# Altium footprint library CHIP-Library.PcbLib: 345 footprints (part 3 of 22)
Each footprint in its own frame and in the unit in brackets; x right, y up, seen from the top. Pads: shape width x height; smd on the part's side, far side on the other; paste and mask are expansions set on the pad; w line width, h text height; cw(c..) or ccw(c..) is an arc to the next point about the centre after c.
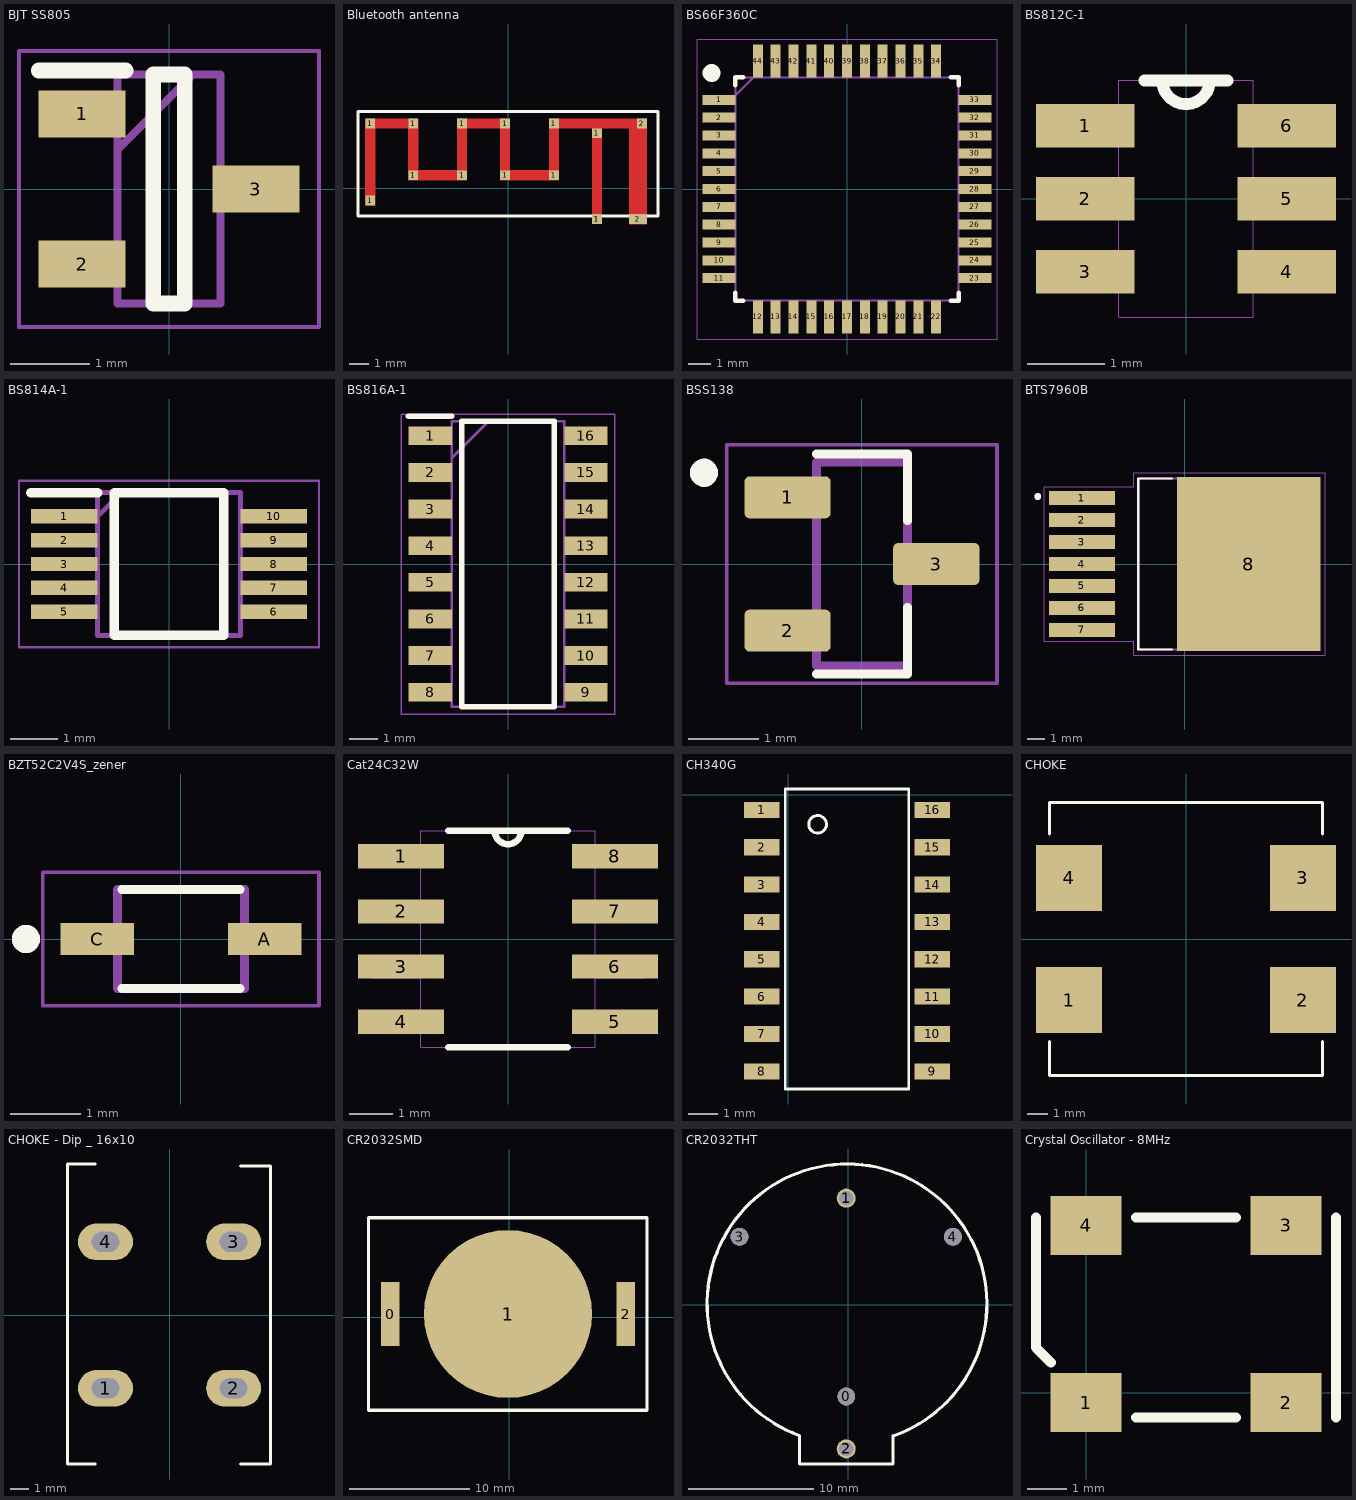
[diagram p2: the footprints below, top view; thin cyan lines are the x and y axes]

## BJT SS805 [mm]
pads (3):
  rect 1.1x0.6 smd: 1(-1.1,0.95) 2(-1.1,-0.95) 3(1.1,0)
Top Overlay:
  lines w0.2: -1.65,1.5 -0.55,1.5 ; -0.2,-1.45 -0.2,1.45 0.2,1.45 0.2,-1.45 -0.2,-1.45
Mechanical 4:
  lines w0.05: -1.9,-1.75 -1.9,1.75 ; -1.9,-1.75 1.9,-1.75 ; -1.9,-1.75 -1.9,1.75 ; -1.9,-1.75 1.9,-1.75 ; -1.9,1.75 1.9,1.75 ; -1.9,1.75 1.9,1.75 ; 1.9,-1.75 1.9,1.75 ; 1.9,-1.75 1.9,1.75
  lines w0.1: -0.65,-1.45 -0.65,0.5 ; -0.65,-1.45 0.65,-1.45 ; -0.65,-1.45 -0.65,0.5 ; -0.65,-1.45 0.65,-1.45 ; -0.65,0.5 0.3,1.45 ; -0.65,0.5 -0.65,1.45 ; -0.65,0.5 0.3,1.45 ; -0.65,0.5 -0.65,1.45 ; -0.65,1.45 0.3,1.45 ; -0.65,1.45 0.3,1.45 ; 0.3,1.45 0.65,1.45 ; 0.3,1.45 0.65,1.45 ; 0.65,-1.45 0.65,1.45 ; 0.65,-1.45 0.65,1.45
3D body "CircuitWorks-SOT-23.step": height 1.11, standoff 0.01, extent -1.25,-1.5 1.25,1.5

## Bluetooth antenna [mm]
pads (15):
  rect 0.5x0.5 smd: 1(-7.05,-0.63) 1(-7.05,3.31) 1(-4.85,0.67) 1(-4.85,3.31) 1(-2.35,0.67) 1(-2.35,3.31) 1(-0.15,0.67) 1(-0.15,3.31) 1(2.35,0.67) 1(2.35,3.31) 1(4.55,2.81) 1(4.55,-1.59) 1(4.55,-1.59) 2(6.85,3.31)
  rect 0.9x0.5 smd: 2(6.65,-1.59)
Top Layer:
  region: -2.1,0.42 -2.1,3.56 -2.6,3.56 -2.6,0.42
  region: 0.101,3.06 0.101,3.56 -2.6,3.56 -2.6,3.06
  region: 0.101,0.42 0.101,3.56 -0.4,3.56 -0.4,0.42
  region: 2.6,0.419 2.6,0.919 -0.4,0.919 -0.4,0.419
  region: 7.099,-1.84 7.099,3.56 6.2,3.56 6.2,-1.84
  region: 4.801,-1.498 4.801,3.31 4.3,3.31 4.3,-1.498
  region: 2.6,0.42 2.6,3.56 2.1,3.56 2.1,0.42
  region: -4.6,0.42 -4.6,3.56 -5.1,3.56 -5.1,0.42
  region: -5.1,0.92 -5.1,0.42 -2.399,0.42 -2.399,0.92
  region: -4.6,3.06 -4.6,3.559 -7.3,3.559 -7.3,3.06
  region: -6.8,-0.88 -6.8,3.56 -7.3,3.56 -7.3,-0.88
  lines w0.5: 2.35,3.31 6.85,3.31
Top Overlay:
  lines w0.15: -7.675,-1.415 7.675,-1.415 7.675,3.935 -7.675,3.935 -7.675,-1.415
Top Solder:
  region: 5.231,-4.01 5.231,-1.09 3.831,-1.09 3.831,-4.01
  lines w0.5: -7.05,-0.63 -7.05,3.31 -4.85,3.31 -4.85,0.67 -2.35,0.67 -2.35,3.31 -0.15,3.31 -0.15,0.67 2.35,0.67 2.35,3.31 6.85,3.31 ; 4.55,-1.59 4.55,3.31
  lines w0.9: 6.65,-1.39 6.65,3.11

## BS66F360C [mm] "QFP80P1200X1200X160-44N"
height 1.5
pads (44):
  rect 1.475x0.45 smd paste-1: 1(-5.738,4) 2(-5.738,3.2) 3(-5.738,2.4) 4(-5.738,1.6) 5(-5.738,0.8) 6(-5.738,0) 7(-5.738,-0.8) 8(-5.738,-1.6) 9(-5.738,-2.4) 10(-5.738,-3.2) 11(-5.738,-4) 23(5.738,-4) 24(5.738,-3.2) 25(5.738,-2.4) 26(5.738,-1.6) 27(5.738,-0.8) 28(5.738,0) 29(5.738,0.8) 30(5.738,1.6) 31(5.738,2.4) 32(5.738,3.2) 33(5.738,4)
  rect 0.45x1.475 smd paste-1: 12(-4,-5.738) 13(-3.2,-5.738) 14(-2.4,-5.738) 15(-1.6,-5.738) 16(-0.8,-5.738) 17(0,-5.738) 18(0.8,-5.738) 19(1.6,-5.738) 20(2.4,-5.738) 21(3.2,-5.738) 22(4,-5.738) 34(4,5.738) 35(3.2,5.738) 36(2.4,5.738) 37(1.6,5.738) 38(0.8,5.738) 39(0,5.738) 40(-0.8,5.738) 41(-1.6,5.738) 42(-2.4,5.738) 43(-3.2,5.738) 44(-4,5.738)
Top Overlay:
  circle w0.4: c-6.075,5.2 r0.2
  lines w0.2: -5,-4.65 -5,-5 -4.65,-5 ; -5,4.65 -5,5 -4.65,5 ; 4.65,-5 5,-5 5,-4.65 ; 4.65,5 5,5 5,4.65
Top Paste:
  region: 4.175,4.995 4.175,6.475 3.825,6.475 3.825,4.995
  region: 3.375,4.995 3.375,6.475 3.025,6.475 3.025,4.995
  region: 2.575,4.995 2.575,6.475 2.225,6.475 2.225,4.995
  region: 1.775,4.995 1.775,6.475 1.425,6.475 1.425,4.995
  region: 0.975,4.995 0.975,6.475 0.625,6.475 0.625,4.995
  region: 0.175,4.995 0.175,6.475 -0.175,6.475 -0.175,4.995
  region: -0.625,4.995 -0.625,6.475 -0.975,6.475 -0.975,4.995
  region: -1.425,4.995 -1.425,6.475 -1.775,6.475 -1.775,4.995
  region: -2.225,4.995 -2.225,6.475 -2.575,6.475 -2.575,4.995
  region: -3.025,4.995 -3.025,6.475 -3.375,6.475 -3.375,4.995
  region: -3.825,4.995 -3.825,6.475 -4.175,6.475 -4.175,4.995
  region: 4.175,-6.481 4.175,-5.001 3.825,-5.001 3.825,-6.481
  region: 3.375,-6.481 3.375,-5.001 3.025,-5.001 3.025,-6.481
  region: 2.575,-6.481 2.575,-5.001 2.225,-5.001 2.225,-6.481
  region: 1.775,-6.481 1.775,-5.001 1.425,-5.001 1.425,-6.481
  region: 0.975,-6.481 0.975,-5.001 0.625,-5.001 0.625,-6.481
  region: 0.175,-6.481 0.175,-5.001 -0.175,-5.001 -0.175,-6.481
  region: -0.625,-6.481 -0.625,-5.001 -0.975,-5.001 -0.975,-6.481
  region: -1.425,-6.481 -1.425,-5.001 -1.775,-5.001 -1.775,-6.481
  region: -2.225,-6.481 -2.225,-5.001 -2.575,-5.001 -2.575,-6.481
  region: -3.025,-6.481 -3.025,-5.001 -3.375,-5.001 -3.375,-6.481
  region: -3.825,-6.481 -3.825,-5.001 -4.175,-5.001 -4.175,-6.481
  rectangle: -6.481,-4.175 -5.001,-3.825
  rectangle: -6.481,-3.375 -5.001,-3.025
  rectangle: -6.481,-2.575 -5.001,-2.225
  rectangle: -6.481,-1.775 -5.001,-1.425
  rectangle: -6.481,-0.975 -5.001,-0.625
  rectangle: -6.481,-0.175 -5.001,0.175
  rectangle: -6.481,0.625 -5.001,0.975
  rectangle: -6.481,1.425 -5.001,1.775
  rectangle: -6.481,2.225 -5.001,2.575
  rectangle: -6.481,3.025 -5.001,3.375
  rectangle: -6.481,3.825 -5.001,4.175
  rectangle: 4.995,-4.175 6.475,-3.825
  rectangle: 4.995,-3.375 6.475,-3.025
  rectangle: 4.995,-2.575 6.475,-2.225
  rectangle: 4.995,-1.775 6.475,-1.425
  rectangle: 4.995,-0.975 6.475,-0.625
  rectangle: 4.995,-0.175 6.475,0.175
  rectangle: 4.995,0.625 6.475,0.975
  rectangle: 4.995,1.425 6.475,1.775
  rectangle: 4.995,2.225 6.475,2.575
  rectangle: 4.995,3.025 6.475,3.375
  rectangle: 4.995,3.825 6.475,4.175
Top Courtyard:
  lines w0.05: -6.725,-6.725 -6.725,6.725 6.725,6.725 6.725,-6.725 -6.725,-6.725
Mechanical 13:
  lines w0.1: -5,4.2 -4.2,5 ; -5,-5 5,-5 5,5 -5,5 -5,-5
3D body "BS66F360.stp": height 1.6, standoff 0, extent -6,-6 6,6

## BS812C-1 [mil] "SOT23-6"
pads (6):
  rect 50x22 smd: 1(-51,37) 2(-51,0) 3(-51,-37) 4(51,-37) 5(51,0) 6(51,37)
Top Overlay:
  lines w6: -21,60 -12,60 ; 21,60 12,60 ; -12,60 ccw(c0,60) 12,60 ; -12,60 12,60
Mechanical 4:
  lines w0: -59,-47 -34,-47 ; -59,-47 -59,-28 ; -59,-47 -34,-47 ; -59,-47 -59,-28 ; -59,-28 -34,-28 ; -59,-28 -34,-28 ; -59,-10 -34,-10 ; -59,-10 -59,10 ; -59,-10 -34,-10 ; -59,-10 -59,10 ; -59,10 -34,10 ; -59,10 -34,10 ; -59,28 -34,28 ; -59,28 -59,47 ; -59,28 -34,28 ; -59,28 -59,47 ; -59,47 -34,47 ; -59,47 -34,47 ; -34,-60 -34,-47 ; -34,-60 34,-60 ; -34,-60 -34,-47 ; -34,-60 34,-60 ; -34,-47 -34,-28 ; -34,-47 -34,-28 ; -34,-28 -34,-10 ; -34,-28 -34,-10 ; -34,-10 -34,10 ; -34,-10 -34,10 ; -34,10 -34,28 ; -34,10 -34,28 ; -34,28 -34,47 ; -34,28 -34,47 ; -34,47 -34,60 ; -34,47 -34,60 ; -34,60 -12,60 ; -34,60 -12,60 ; -12,60 ccw(c0,60) 12,60 ; -12,60 ccw(c0,60) 12,60 ; -12,60 12,60 ; -12,60 12,60 ; 12,60 34,60 ; 12,60 34,60 ; 34,-60 34,-47 ; 34,-60 34,-47 ; 34,-47 59,-47 ; 34,-47 34,-28 ; 34,-47 59,-47 ; 34,-47 34,-28 ; 34,-28 59,-28 ; 34,-28 34,-10 ; 34,-28 59,-28 ; 34,-28 34,-10 ; 34,-10 59,-10 ; 34,-10 34,10 ; 34,-10 59,-10 ; 34,-10 34,10 ; 34,10 59,10 ; 34,10 34,28 ; 34,10 59,10 ; 34,10 34,28 ; 34,28 59,28 ; 34,28 34,47 ; 34,28 59,28 ; 34,28 34,47 ; 34,47 59,47 ; 34,47 34,60 ; 34,47 59,47 ; 34,47 34,60 ; 59,-47 59,-28 ; 59,-47 59,-28 ; 59,-10 59,10 ; 59,-10 59,10 ; 59,28 59,47 ; 59,28 59,47
3D body "User Library-SOT23-6-2.STEP": height 57.09, standoff 0, extent -55.11,-57.09 55.13,57.08

## BS814A-1 [mm]
pads (10):
  rect 1.4x0.3 smd: 1(-2.2,1) 2(-2.2,0.5) 3(-2.2,0) 4(-2.2,-0.5) 5(-2.2,-1) 6(2.2,-1) 7(2.2,-0.5) 8(2.2,0) 9(2.2,0.5) 10(2.2,1)
Top Overlay:
  lines w0.2: -2.9,1.5 -1.5,1.5 ; -1.15,-1.5 1.15,-1.5 1.15,1.5 -1.15,1.5 -1.15,-1.5
Mechanical 13:
  lines w0.1: -1.5,1 -1,1.5 ; -1.5,-1.5 1.5,-1.5 1.5,1.5 -1.5,1.5 -1.5,-1.5
Mechanical 15:
  lines w0.05: -3.15,-1.75 3.15,-1.75 3.15,1.75 -3.15,1.75 -3.15,-1.75
3D body "BS814A-1.stp": height 1.1, standoff 0, extent -2.45,-1.5 2.45,1.5

## BS816A-1 [mm]
pads (16):
  rect 1.5x0.65 smd: 1(-2.7,4.445) 2(-2.7,3.175) 3(-2.7,1.905) 4(-2.7,0.635) 5(-2.7,-0.635) 6(-2.7,-1.905) 7(-2.7,-3.175) 8(-2.7,-4.445) 9(2.7,-4.445) 10(2.7,-3.175) 11(2.7,-1.905) 12(2.7,-0.635) 13(2.7,0.635) 14(2.7,1.905) 15(2.7,3.175) 16(2.7,4.445)
Top Overlay:
  lines w0.2: -3.45,5.12 -1.95,5.12 ; -1.6,-4.95 -1.6,4.95 1.6,4.95 1.6,-4.95 -1.6,-4.95
Mechanical 13:
  lines w0.1: -1.95,3.68 -0.68,4.95 ; -1.95,-4.95 -1.95,4.95 1.95,4.95 1.95,-4.95 -1.95,-4.95
Mechanical 15:
  lines w0.05: -3.7,-5.2 -3.7,5.2 3.7,5.2 3.7,-5.2 -3.7,-5.2
3D body "BS816A-1.stp": height 1.75, standoff 0, extent -3,-4.95 3,4.95

## BSS138 [mm] "SOT23-3"
pads (3):
  rrect25% 1.23x0.6 smd: 1(-1.06,0.95) 2(-1.06,-0.95) 3(1.06,0)
Top Overlay:
  circle w0.2: c-2.25,1.3 r0.1
  lines w0.127: -0.65,-1.57 0.65,-1.57 0.65,-0.62 ; -0.65,1.57 0.65,1.57 0.65,0.62
Mechanical 13:
  circle w0.2: c-2.25,1.3 r0.1
  lines w0.127: -0.65,-1.45 0.65,-1.45 0.65,1.45 -0.65,1.45 -0.65,-1.45
Mechanical 15:
  lines w0.05: -1.925,-1.7 -1.925,1.7 1.925,1.7 1.925,-1.7 -1.925,-1.7
3D body "SOT-23.STEP": height 1, standoff 0, extent -1.3,-1.45 1.3,1.45

## BTS7960B [mm] "High Current PN Half Bridge P-TO-263-7"
pads (8):
  rect 3.81x0.8 smd: 1(-5.95,3.81) 2(-5.95,2.54) 3(-5.95,1.27) 4(-5.95,0) 5(-5.95,-1.27) 6(-5.95,-2.54) 7(-5.95,-3.81)
  rect 8.29x10.07 smd paste-6: 8(3.71,0)
Top Overlay:
  circle w0.2: c-8.5,3.9 r0.1
  lines w0.127: -0.749,-4.95 -2.69,-4.95 -2.69,4.95 -0.749,4.95
Top Paste:
  region: 4.385,-0.825 3.035,-0.825 3.035,0.825 4.385,0.825
  region: 4.385,1.195 3.035,1.195 3.035,2.845 4.385,2.845
  region: 4.385,3.215 3.035,3.215 3.035,4.865 4.385,4.865
  region: 4.385,-2.845 3.035,-2.845 3.035,-1.195 4.385,-1.195
  region: 4.385,-4.865 3.035,-4.865 3.035,-3.215 4.385,-3.215
  region: 7.145,3.215 5.795,3.215 5.795,4.865 7.145,4.865
  region: 7.145,1.195 5.795,1.195 5.795,2.845 7.145,2.845
  region: 7.145,-0.825 5.795,-0.825 5.795,0.825 7.145,0.825
  region: 7.145,-2.845 5.795,-2.845 5.795,-1.195 7.145,-1.195
  region: 7.145,-4.865 5.795,-4.865 5.795,-3.215 7.145,-3.215
  region: 1.625,-4.865 0.275,-4.865 0.275,-3.215 1.625,-3.215
  region: 1.625,-2.845 0.275,-2.845 0.275,-1.195 1.625,-1.195
  region: 1.625,-0.825 0.275,-0.825 0.275,0.825 1.625,0.825
  region: 1.625,1.195 0.275,1.195 0.275,2.845 1.625,2.845
  region: 1.625,3.215 0.275,3.215 0.275,4.865 1.625,4.865
Mechanical 13:
  circle w0.2: c-8.5,3.9 r0.1
  lines w0.127: -2.69,-4.95 6.71,-4.95 6.71,4.95 -2.69,4.95 -2.69,-4.95
Mechanical 15:
  lines w0.05: -8.11,-4.46 -2.94,-4.46 -2.94,-5.29 8.11,-5.29 8.11,5.29 -2.94,5.29 -2.94,4.46 -8.11,4.46 -8.11,-4.46
3D body "User Library-TO263-7-1-1.STEP": height 4.81, standoff 0.01, extent -7.93,-5 7.74,5

## BZT52C2V4S_zener [mm]
pads (2):
  rect 1.04x0.46 smd: A(1.19,0) C(-1.19,0)
Top Overlay:
  circle w0.2: c-2.2,0 r0.1
  lines w0.127: -0.84,-0.7 0.84,-0.7 ; -0.84,0.7 0.84,0.7
Mechanical 4:
  circle w0.2: c-2.2,0 r0.1
  circle w0.2: c-2.2,0 r0.1
  lines w0.127: -0.9,-0.7 -0.9,0.7 ; -0.9,-0.7 0.9,-0.7 ; -0.9,-0.7 -0.9,0.7 ; -0.9,-0.7 0.9,-0.7 ; -0.9,0.7 0.9,0.7 ; -0.9,0.7 0.9,0.7 ; 0.9,-0.7 0.9,0.7 ; 0.9,-0.7 0.9,0.7
Mechanical 16:
  lines w0.05: -1.96,-0.95 -1.96,0.95 1.96,0.95 1.96,-0.95 -1.96,-0.95

## Cat24C32W [mil]
pads (8):
  rect 78x22 smd: 1(-97,75) 2(-97,25) 3(-97,-25) 4(-97,-75) 5(97,-75) 6(97,-25) 7(97,25) 8(97,75)
Top Overlay:
  lines w6: -54,-98 54,-98 ; -54,98 -12,98 ; 54,98 12,98 ; -12,98 ccw(c0,98) 12,98 ; -12,98 12,98
Mechanical 4:
  lines w0: -122,-85 -122,-65 ; -122,-85 -79,-85 ; -122,-85 -122,-65 ; -122,-85 -79,-85 ; -122,-65 -79,-65 ; -122,-65 -79,-65 ; -122,-35 -122,-15 ; -122,-35 -79,-35 ; -122,-35 -122,-15 ; -122,-35 -79,-35 ; -122,-15 -79,-15 ; -122,-15 -79,-15 ; -122,15 -122,35 ; -122,15 -79,15 ; -122,15 -122,35 ; -122,15 -79,15 ; -122,35 -79,35 ; -122,35 -79,35 ; -122,65 -122,85 ; -122,65 -79,65 ; -122,65 -122,85 ; -122,65 -79,65 ; -122,85 -79,85 ; -122,85 -79,85 ; -79,-98 79,-98 ; -79,-98 -79,98 ; -79,-98 79,-98 ; -79,-98 -79,98 ; -79,-85 -79,-65 ; -79,-85 -79,-65 ; -79,-35 -79,-15 ; -79,-35 -79,-15 ; -79,15 -79,35 ; -79,15 -79,35 ; -79,65 -79,85 ; -79,65 -79,85 ; -79,98 -12,98 ; -79,98 -12,98 ; -12,98 ccw(c0,98) 12,98 ; -12,98 ccw(c0,98) 12,98 ; -12,98 12,98 ; -12,98 12,98 ; 12,98 79,98 ; 12,98 79,98 ; 79,-98 79,98 ; 79,-98 79,98 ; 79,-85 79,-65 ; 79,-85 122,-85 ; 79,-85 79,-65 ; 79,-85 122,-85 ; 79,-65 122,-65 ; 79,-65 122,-65 ; 79,-35 79,-15 ; 79,-35 122,-35 ; 79,-35 79,-15 ; 79,-35 122,-35 ; 79,-15 122,-15 ; 79,-15 122,-15 ; 79,15 79,35 ; 79,15 122,15 ; 79,15 79,35 ; 79,15 122,15 ; 79,35 122,35 ; 79,35 122,35 ; 79,65 79,85 ; 79,65 122,65 ; 79,65 79,85 ; 79,65 122,65 ; 79,85 122,85 ; 79,85 122,85 ; 122,-85 122,-65 ; 122,-85 122,-65 ; 122,-35 122,-15 ; 122,-35 122,-15 ; 122,15 122,35 ; 122,15 122,35 ; 122,65 122,85 ; 122,65 122,85
3D body "MAX1562ESA+--3DModel-STEP-56544.STEP": height 59.56, standoff -9.34, extent -118.1,-96.46 118.11,96.45

## CH340G [mm]
pads (16):
  rect 1.2x0.55 smd: 1(-0.9,-0.51) 2(-0.9,-1.78) 3(-0.9,-3.05) 4(-0.9,-4.32) 5(-0.9,-5.59) 6(-0.9,-6.86) 7(-0.9,-8.13) 8(-0.9,-9.4) 9(4.9,-9.4) 10(4.9,-8.13) 11(4.9,-6.86) 12(4.9,-5.59) 13(4.9,-4.32) 14(4.9,-3.05) 15(4.9,-1.78) 16(4.9,-0.51)
Top Overlay:
  circle w0.1: c1,-1 r0.3
  lines w0.1: -0.1,-10 4.1,-10 4.1,0.2 -0.1,0.2 -0.1,-10
3D body "SO-16.step": height 1.45, standoff 0, extent -0.953,-9.9 4.953,0.082

## CHOKE [mm] "SMD Common MODE Filter"
height 10
pads (4):
  rect 3.2x3.2 smd: 1(-5.65,-2.95) 2(5.65,-2.95) 3(5.65,2.95) 4(-5.65,2.95)
Top Overlay:
  lines w0.152: -6.6,-4.953 -6.6,-6.6 6.6,-6.6 6.6,-4.953 ; -6.6,5.08 -6.6,6.6 6.6,6.6 6.6,5.08
3D body "Coilcraft-CF3094-AL.step": height 5.16, standoff -0.3, extent -6.35,-6.223 6.35,6.477

## CHOKE - Dip _ 16x10 [mm] "SMD Common MODE Filter ECMT1V1717S"
height 10
pads (4):
  oval 3x2 hole 1.1 slot 1.5 at 0 deg: 1(-3.5,-4) 2(3.5,-4) 3(3.5,4) 4(-3.5,4)
Top Overlay:
  lines w0.152: -4.064,-8.141 -5.584,-8.141 -5.584,8.255 -4.064,8.255 ; 3.876,-8.141 5.523,-8.141 5.523,8.141 3.876,8.141
3D body "User Library-UU9LF.step": height 16.31, standoff -3, extent -5.5,-8.141 5.5,8.141

## CR2032SMD [mil]
pads (3):
  rect 60x210 smd: 0(-390,10) 2(381.65,10)
  round 550 smd: 1(-4.17,10)
Top Overlay:
  lines w10: -460,-305 -460,325 450,325 450,-305 -460,-305

## CR2032THT [mil]
pads (5):
  round 56 hole 56: 0(-6,-289) 3(-343,215) 4(330,215)
  round 60 hole 45: 1(-6.5,336.5) 2(-6.5,-454.5)
Top Overlay:
  lines w10: 141,-412 141,-502 -154,-502 -154,-412 cw(c-4,3) 141.55,-413.58

## Crystal Oscillator - 8MHz [mm]
pads (4):
  rect 1.8x1.5 smd: 1(0,-0.25) 2(5.08,-0.25) 3(5.08,4.25) 4(0,4.25)
Top Overlay:
  lines w0.254: -1.27,4.445 -1.27,1.143 -0.889,0.762 ; 1.27,-0.635 2.572,-0.635 3.81,-0.635 ; 1.27,4.445 3.81,4.445 ; 6.35,-0.635 6.35,4.445